# Altium footprint library Footprint-Lib-PhilsLab.PcbLib: 351 footprints (part 19 of 22)
Each footprint in its own frame and in the unit in brackets; x right, y up, seen from the top. Pads: shape width x height; smd on the part's side, far side on the other; paste and mask are expansions set on the pad; w line width, h text height; cw(c..) or ccw(c..) is an arc to the next point about the centre after c.
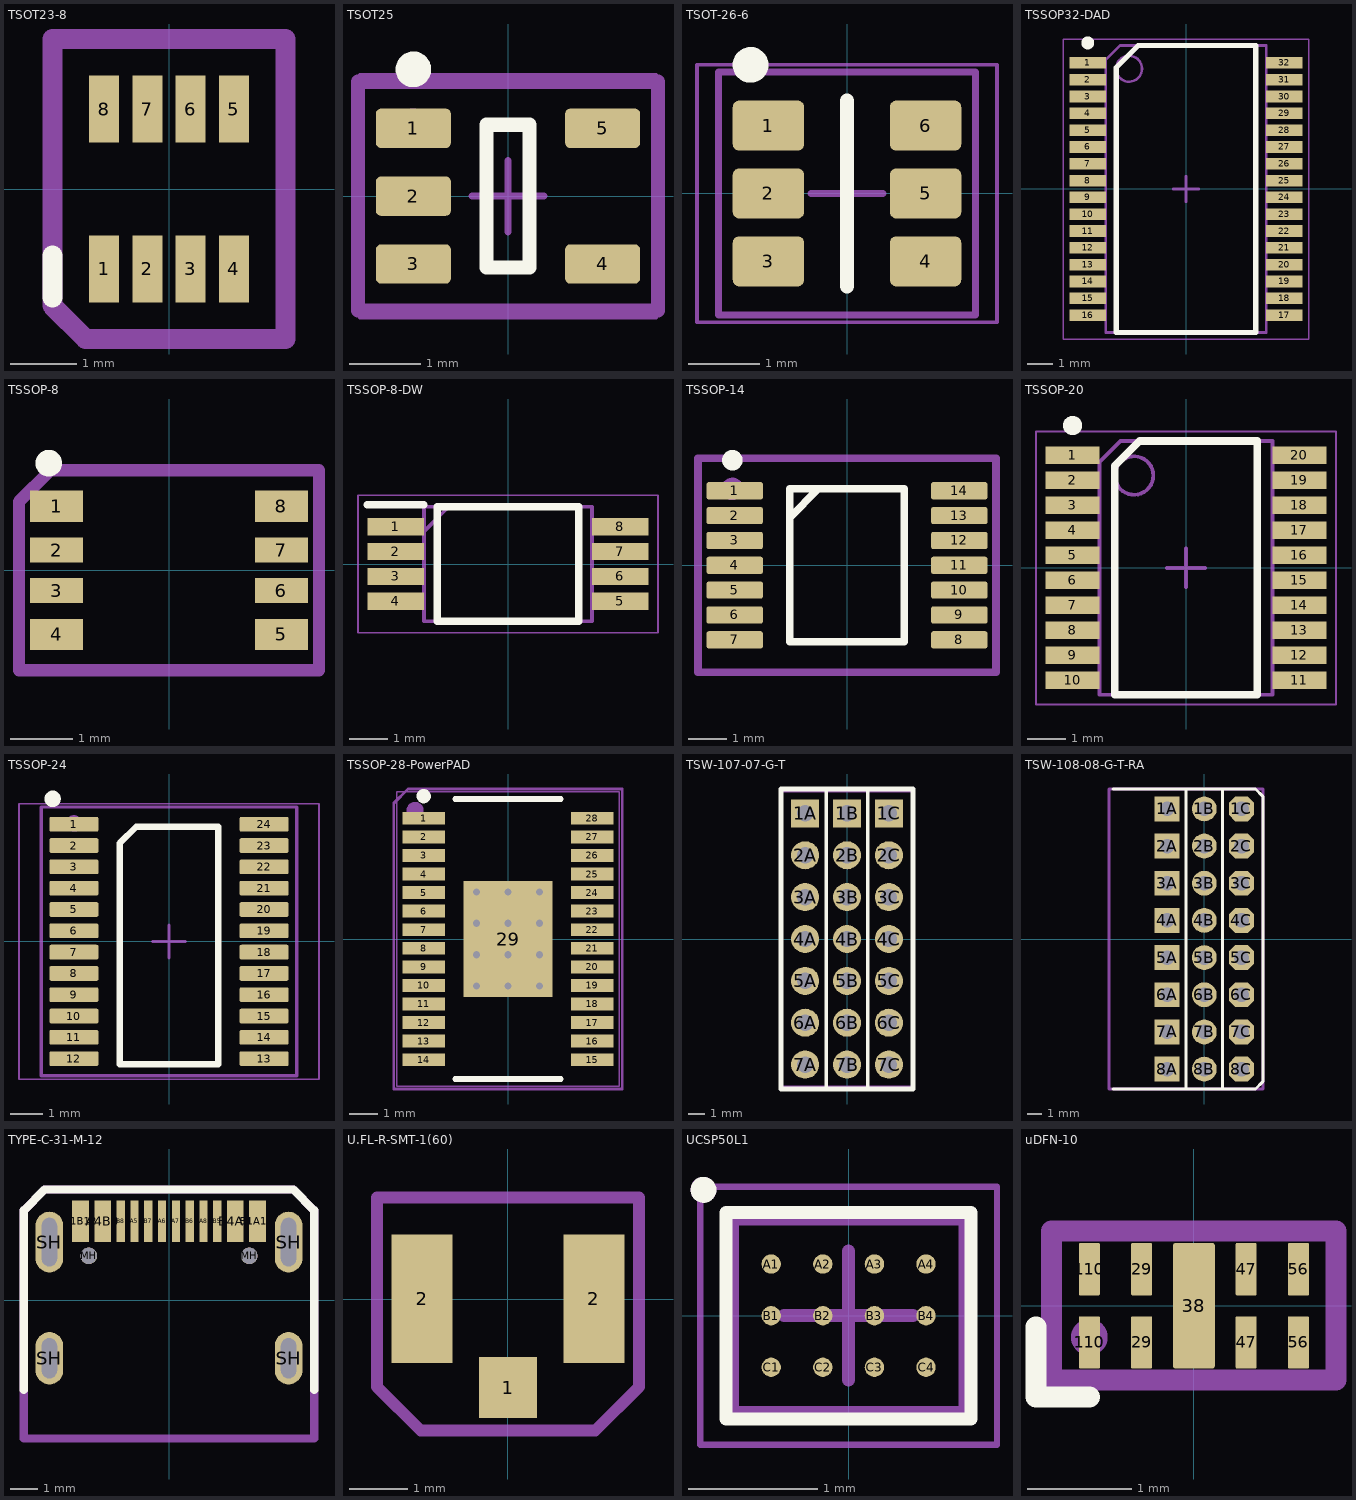
[diagram p18: the footprints below, top view; thin cyan lines are the x and y axes]

## TSOT23-8 [mm]
pads (8):
  rect 0.45x1 smd: 1(-0.975,-1.2) 2(-0.325,-1.2) 3(0.325,-1.2) 4(0.975,-1.2) 5(0.975,1.2) 6(0.325,1.2) 7(-0.325,1.2) 8(-0.975,1.2)
Top Overlay:
  lines w0.3: -1.75,-1.628 -1.75,-1
Mechanical 13:
  lines w0.3: -1.75,-1.75 -1.75,0 -1.75,2.25 1.75,2.25 1.75,-2.25 -1.25,-2.25 -1.75,-1.75
  text "'.Designator'" at -5.84,-0.925 h1
3D body "TSOT-23-8.STEP": height 1.01, standoff 0.01, extent -1.45,-1.4 1.45,1.4

## TSOT25 [mm] "SOT23, 5-Leads, Body 2.90x2.80mm, Pitch 0.95mm, IPC Medium Density"
height 1
pads (5):
  rrect25% 1.05x0.55 smd: 1(-1.325,0.95) 2(-1.325,0) 3(-1.325,-0.95) 4(1.325,-0.95) 5(1.325,0.95)
Top Overlay:
  circle w0.25: c-1.325,1.775 r0.125
  lines w0.2: -0.3,-1 -0.3,1 0.3,1 0.3,-1 -0.3,-1
Mechanical 13:
  circle w0.25: c-1.325,0.975 r0.125
  lines w0.2: -2.1,-1.6 -2.1,1.6 2.1,1.6 2.1,-1.6 -2.1,-1.6
  text "'.Designator'" at -5.815,-0.9 h1
Mechanical 15:
  lines w0.05: -2.075,-1.7 2.075,-1.7 2.075,1.7 -2.075,1.7 -2.075,-1.7
  lines w0.1: -0.5,0 0.5,0 ; 0,-0.5 0,0.5
3D body "TSOT25.step": height 1, standoff 0, extent -1.4,-1.45 1.4,1.45

## TSOT-26-6 [mm] "TSOP, 6-Leads, Body 2.90x1.60mm, Pitch 0.95mm, IPC Medium Density"
height 1
pads (6):
  rrect25% 1x0.7 smd: 1(-1.1,0.95) 2(-1.1,0) 3(-1.1,-0.95) 4(1.1,-0.95) 5(1.1,0) 6(1.1,0.95)
Top Overlay:
  circle w0.25: c-1.35,1.8 r0.125
  lines w0.2: 0,-1.3 0,1.3
Mechanical 13:
  lines w0.1: -1.8,-1.7 -1.8,1.7 1.8,1.7 1.8,-1.7 -1.8,-1.7
  text ".Designator" at -4.998,-0.333 h1
Mechanical 15:
  lines w0.05: -2.1,-1.8 -2.1,1.8 2.1,1.8 2.1,-1.8 -2.1,-1.8
  lines w0.1: -0.5,0 0.5,0 ; 0,-0.5 0,0.5
3D body "TSOT-26-6.step": height 1, standoff 0, extent -1.4,-1.55 1.4,1.55

## TSSOP32-DAD [mm] "TSOP, 32-Leads, Body 11.00x6.10mm, Pitch 0.65mm, IPC Medium Density"
height 1.15
pads (32):
  rect 1.4x0.45 smd: 1(-3.8,4.875) 2(-3.8,4.225) 3(-3.8,3.575) 4(-3.8,2.925) 5(-3.8,2.275) 6(-3.8,1.625) 7(-3.8,0.975) 8(-3.8,0.325) 9(-3.8,-0.325) 10(-3.8,-0.975) 11(-3.8,-1.625) 12(-3.8,-2.275) 13(-3.8,-2.925) 14(-3.8,-3.575) 15(-3.8,-4.225) 16(-3.8,-4.875) 17(3.8,-4.875) 18(3.8,-4.225) 19(3.8,-3.575) 20(3.8,-2.925) 21(3.8,-2.275) 22(3.8,-1.625) 23(3.8,-0.975) 24(3.8,-0.325) 25(3.8,0.325) 26(3.8,0.975) 27(3.8,1.625) 28(3.8,2.275) 29(3.8,2.925) 30(3.8,3.575) 31(3.8,4.225) 32(3.8,4.875)
Top Overlay:
  circle w0.25: c-3.8,5.65 r0.125
  lines w0.2: -2.7,-5.55 2.7,-5.55 2.7,5.55 -1.85,5.55 -2.7,4.7 -2.7,-5.55
Mechanical 13:
  circle w0.1: c-2.2,4.65 r0.5
  lines w0.1: -3.1,-5.55 -3.1,5 -2.55,5.55 3.1,5.55 3.1,-5.55 -3.1,-5.55
  text "'.Designator'" at -6.315,-1.4 h1
Mechanical 15:
  lines w0.05: -4.75,-5.8 -4.75,5.8 4.75,5.8 4.75,-5.8 -4.75,-5.8
  lines w0.1: -0.5,0 0.5,0 ; 0,-0.5 0,0.5
3D body "TSSOP32-DAD.step": height 1.15, standoff 0, extent -4.05,-5.55 4.05,5.55

## TSSOP-8 [mm]
pads (8):
  rect 0.85x0.5 smd mask+0.07: 1(-1.8,1.025) 4(-1.8,-1.025) 5(1.8,-1.025) 8(1.8,1.025)
  rect 0.85x0.4 smd mask+0.07: 2(-1.8,0.325) 3(-1.8,-0.325) 6(1.8,-0.325) 7(1.8,0.325)
Top Overlay:
  circle w0.25: c-1.925,1.715 r0.088
Mechanical 13:
  lines w0.2: -2.4,-1.6 2.4,-1.6 2.4,1.6 -1.9,1.6 -2.4,1.1 -2.4,0 -2.4,-1.6
  text "'.Designator'" at -5.84,-0.925 h1
3D body "TSSPO8.step": height 0.86, standoff -0.06, extent -2.018,-1.5 2.006,1.5

## TSSOP-8-DW [mm]
pads (8):
  rect 1.475x0.45 smd mask+0.05: 1(-2.938,0.975) 2(-2.938,0.325) 3(-2.938,-0.325) 4(-2.938,-0.975) 5(2.938,-0.975) 6(2.938,-0.325) 7(2.938,0.325) 8(2.938,0.975)
Top Overlay:
  lines w0.2: -3.675,1.55 -2.2,1.55 ; -1.85,-1.5 1.85,-1.5 1.85,1.5 -1.85,1.5 -1.85,-1.5
Mechanical 13:
  lines w0.1: -2.2,0.85 -1.55,1.5 ; -2.2,-1.5 2.2,-1.5 2.2,1.5 -2.2,1.5 -2.2,-1.5
  text "'.Designator'" at -5.84,-0.925 h1
Mechanical 15:
  lines w0.05: -3.925,-1.8 3.925,-1.8 3.925,1.8 -3.925,1.8 -3.925,-1.8
3D body "M24C08-RDW6TP.stp": height 1.2, standoff 0, extent -3.2,-1.5 3.2,1.5

## TSSOP-14 [mm]
pads (14):
  rrect25% 1.475x0.45 smd mask+0.05: 1(-2.938,1.95) 2(-2.938,1.3) 3(-2.938,0.65) 4(-2.938,0) 5(-2.938,-0.65) 6(-2.938,-1.3) 7(-2.938,-1.95) 8(2.938,-1.95) 9(2.938,-1.3) 10(2.938,-0.65) 11(2.938,0) 12(2.938,0.65) 13(2.938,1.3) 14(2.938,1.95)
Top Overlay:
  circle w0.3: c-3,2.75 r0.118
  lines w0.2: -0.75,2 -1.5,1.25 ; -1.5,1.25 -1.5,1.25 ; -1.5,-2 1.5,-2 1.5,2 -1.5,2 -1.5,-2
Mechanical 13:
  circle w0.3: c-3,2 r0.141
  lines w0.2: -3.9,-2.8 3.9,-2.8 3.9,2.8 -3.9,2.8 -3.9,-2.8
  text "'.Designator'" at -5.84,-0.925 h1
Mechanical 15:
  lines w0.05: -3.925,-2.8 3.925,-2.8 3.925,2.8 -3.925,2.8 -3.925,-2.8
3D body "LM339PW.stp": height 1.13, standoff 0, extent -3.2,-2.5 3.2,2.5

## TSSOP-20 [mm] "TSOP, 20-Leads, Body 6,50x4,40mm, Pitch 0,65mm, IPC Medium Density"
height 1.2
pads (20):
  rect 1.4x0.45 smd mask+0.15: 1(-2.95,2.925) 2(-2.95,2.275) 3(-2.95,1.625) 4(-2.95,0.975) 5(-2.95,0.325) 6(-2.95,-0.325) 7(-2.95,-0.975) 8(-2.95,-1.625) 9(-2.95,-2.275) 10(-2.95,-2.925) 11(2.95,-2.925) 12(2.95,-2.275) 13(2.95,-1.625) 14(2.95,-0.975) 15(2.95,-0.325) 16(2.95,0.325) 17(2.95,0.975) 18(2.95,1.625) 19(2.95,2.275) 20(2.95,2.925)
Top Overlay:
  circle w0.25: c-2.95,3.7 r0.125
  lines w0.2: -1.85,-3.3 -1.85,2.65 -1.2,3.3 1.85,3.3 1.85,-3.3 -1.85,-3.3
Mechanical 13:
  circle w0.1: c-1.35,2.4 r0.5
  lines w0.1: -2.25,-3.3 -2.25,2.75 -1.7,3.3 2.25,3.3 2.25,-3.3 -2.25,-3.3
  text "'.Designator'" at -5.815,-0.9 h1
Mechanical 15:
  lines w0.05: -3.9,-3.55 3.9,-3.55 3.9,3.55 -3.9,3.55 -3.9,-3.55
  lines w0.1: -0.5,0 0.5,0 ; 0,-0.5 0,0.5
3D body "TSSOP-20.step": height 1.2, standoff 0, extent -3.2,-3.3 3.2,3.3

## TSSOP-24 [mm]
height 1.2
pads (24):
  rrect25% 1.5x0.45 smd mask+0.13: 1(-2.9,3.575) 2(-2.9,2.925) 3(-2.9,2.275) 4(-2.9,1.625) 5(-2.9,0.975) 6(-2.9,0.325) 7(-2.9,-0.325) 8(-2.9,-0.975) 9(-2.9,-1.625) 10(-2.9,-2.275) 11(-2.9,-2.925) 12(-2.9,-3.575) 13(2.9,-3.575) 14(2.9,-2.925) 15(2.9,-2.275) 16(2.9,-1.625) 17(2.9,-0.975) 18(2.9,-0.325) 19(2.9,0.325) 20(2.9,0.975) 21(2.9,1.625) 22(2.9,2.275) 23(2.9,2.925) 24(2.9,3.575)
Top Overlay:
  circle w0.25: c-3.55,4.35 r0.125
  lines w0.2: -1.5,-3.75 -1.5,3 -1,3.5 1.5,3.5 1.5,-3.75 -1.5,-3.75
Mechanical 13:
  circle w0.25: c-2.9,3.6 r0.125
  lines w0.1: -3.9,-4.1 -3.9,4.1 3.9,4.1 3.9,-4.1 -3.9,-4.1
  text "'.Designator'" at -7.315,-2.4 h1
Mechanical 15:
  lines w0.05: -4.575,-4.2 -4.575,4.2 4.575,4.2 4.575,-4.2 -4.575,-4.2
  lines w0.1: -0.5,0 0.5,0 ; 0,-0.5 0,0.5
3D body "TSSOP-24.step": height 1.21, standoff 0.01, extent -3.275,-3.95 3.275,3.95

## TSSOP-28-PowerPAD [mm] "TSOP, 28-Leads, Body 9.70x4.40mm, Pitch 0.65mm, Thermal Pad 4.05x3.10mm, IPC Medium Density"
height 1.2
pads (29):
  rect 1.5x0.45 smd: 1(-2.95,4.225) 2(-2.95,3.575) 3(-2.95,2.925) 4(-2.95,2.275) 5(-2.95,1.625) 6(-2.95,0.975) 7(-2.95,0.325) 8(-2.95,-0.325) 9(-2.95,-0.975) 10(-2.95,-1.625) 11(-2.95,-2.275) 12(-2.95,-2.925) 13(-2.95,-3.575) 14(-2.95,-4.225) 15(2.95,-4.225) 16(2.95,-3.575) 17(2.95,-2.925) 18(2.95,-2.275) 19(2.95,-1.625) 20(2.95,-0.975) 21(2.95,-0.325) 22(2.95,0.325) 23(2.95,0.975) 24(2.95,1.625) 25(2.95,2.275) 26(2.95,2.925) 27(2.95,3.575) 28(2.95,4.225)
  rect 3.1x4.05 smd: 29(0,0)
via 1.1,-1.65 diameter 0.6 hole 0.25
via 0,-1.65 diameter 0.6 hole 0.25
via -1.1,-1.65 diameter 0.6 hole 0.25
via 1.1,-0.55 diameter 0.6 hole 0.25
via 0,-0.55 diameter 0.6 hole 0.25
via -1.1,-0.55 diameter 0.6 hole 0.25
via 1.1,0.55 diameter 0.6 hole 0.25
via 0,0.55 diameter 0.6 hole 0.25
via -1.1,0.55 diameter 0.6 hole 0.25
via 1.1,1.65 diameter 0.6 hole 0.25
via 0,1.65 diameter 0.6 hole 0.25
via -1.1,1.65 diameter 0.6 hole 0.25
Top Overlay:
  circle w0.25: c-2.95,5 r0.125
  lines w0.2: -1.85,-4.9 1.85,-4.9 ; -1.85,4.9 1.85,4.9
Mechanical 13:
  circle w0.3: c-3.25,4.5 r0.15
  lines w0.1: -4,-5.25 -4,4.75 -3.5,5.25 4,5.25 4,-5.25 -4,-5.25
  text "'.Designator'" at -5.665,-0.417 h1
Mechanical 15:
  lines w0.05: -3.9,-5.15 3.9,-5.15 3.9,5.15 -3.9,5.15 -3.9,-5.15
  lines w0.1: -0.5,0 0.5,0 ; 0,-0.5 0,0.5
3D body "TSSOP-28-PowerPAD.step": height 1.2, standoff 0, extent -3.2,-4.9 3.2,4.9

## TSW-107-07-G-T [mm]
pads (21):
  rect 1.7x1.7 hole 1: 1A(-2.54,7.62) 1B(0,7.62) 1C(2.54,7.62)
  round 1.7 hole 1: 2A(-2.54,5.08) 2B(0,5.08) 2C(2.54,5.08) 3A(-2.54,2.54) 3B(0,2.54) 3C(2.54,2.54) 4A(-2.54,0) 4B(0,0) 4C(2.54,0) 5A(-2.54,-2.54) 5B(0,-2.54) 5C(2.54,-2.54) 6A(-2.54,-5.08) 6B(0,-5.08) 6C(2.54,-5.08) 7A(-2.54,-7.62) 7B(0,-7.62) 7C(2.54,-7.62)
Top Overlay:
  lines w0.2: -1.25,-9 -1.25,9 ; 1.25,-9 1.25,9
  lines w0.3: -4,-9.1 4,-9.1 4,9.1 -4,9.1 -4,-9.1
Mechanical 13:
  lines w0.2: -4,-9 4,-9 4,9 -4,9 -4,-9
  text "'.Designator'" at -5.84,-0.925 h1
3D body "TSW-107-07-G-T.stp": height 8.39, standoff -2.53, extent -3.81,-8.89 3.81,8.89

## TSW-108-08-G-T-RA [mm]
pads (24):
  rect 1.7x1.7 hole 1: 1A(-2.54,8.89) 2A(-2.54,6.35) 3A(-2.54,3.81) 4A(-2.54,1.27) 5A(-2.54,-1.27) 6A(-2.54,-3.81) 7A(-2.54,-6.35) 8A(-2.54,-8.89)
  round 1.7 hole 1: 1B(0,8.89) 2B(0,6.35) 3B(0,3.81) 4B(0,1.27) 5B(0,-1.27) 6B(0,-3.81) 7B(0,-6.35) 8B(0,-8.89)
  oct 1.7x1.7 hole 1: 1C(2.54,8.89) 2C(2.54,6.35) 3C(2.54,3.81) 4C(2.54,1.27) 5C(2.54,-1.27) 6C(2.54,-3.81) 7C(2.54,-6.35) 8C(2.54,-8.89)
Top Overlay:
  lines w0.2: -6.25,-10.25 3.5,-10.25 4,-9.75 4,9.75 3.5,10.25 -6.25,10.25 ; -1.25,-10.25 -1.25,10.25 ; 1.25,-10.25 1.25,10.25
Mechanical 13:
  lines w0.2: -6.5,-10.25 -6.5,10.25 4,10.25 4,-10.25 -6.5,-10.25
  text "PCB EDGE" at -6.65,-3.045 h0.5
  text "'.Designator'" at -5.84,-0.925 h1
3D body "TSW-108-08-F-T-RA.stp": height 8.14, standoff -2.27, extent -12.446,-10.16 2.858,10.16

## TYPE-C-31-M-12 [mm]
pads (18):
  rect 0.6x1.5 smd mask+0.07: A1B12(-3.2,2.85) B1A12(3.2,2.85)
  rect 0.6x1.5 smd mask+0.14: A4B9(-2.4,2.85) B4A9(2.4,2.85)
  rect 0.3x1.5 smd mask+0.14: A5(-1.25,2.85) A6(-0.25,2.85) A7(0.25,2.85) A8(1.25,2.85) B5(1.75,2.85) B6(0.75,2.85) B7(-0.75,2.85) B8(-1.75,2.85)
  round 0.6 hole 0.6 unplated mask+0.3: MH(-2.9,1.6) MH(2.9,1.6)
  oval 1x1.9 hole 0.55 slot 1.45 at 90 deg mask+0.05: SH(-4.325,-2.1) SH(4.325,-2.1)
  oval 1x2.2 hole 0.55 slot 1.75 at 90 deg mask+0.05: SH(-4.325,2.1) SH(4.325,2.1)
Top Overlay:
  lines w0.3: -5.25,-3.25 -5.25,3.25 -4.5,4 4.5,4 5.25,3.25 5.25,-3.25
Mechanical 13:
  lines w0.3: -5.25,-5 -5.25,2.75 -5.25,3.25 -4.5,4 4.5,4 5.25,3.25 5.25,-5 -5.25,-5
  text "'.Designator'" at -5.815,-0.9 h1
3D body "TYPE-C-31-M-12.STEP": height 3.32, standoff -0.98, extent -4.47,-4.65 4.47,3.255

## U.FL-R-SMT-1(60) [mm]
pads (3):
  rect 1x1.05 smd mask+0.07: 1(0,-1.512)
  rect 1.05x2.2 smd mask+0.07: 2(-1.475,0.013) 2(1.475,0.013)
Mechanical 13:
  lines w0.2: -2.25,-1.5 -1.5,-2.25 1.5,-2.25 2.25,-1.5 2.25,1.75 -2.25,1.75 -2.25,0 -2.25,-1.5
  text "'.Designator'" at -5.84,-0.925 h1
3D body "U.FL-R-SMT-1.stp": height 1.26, standoff 0.01, extent -1.5,-1.55 1.5,1.55

## UCSP50L1 [mm]
height 0.55
pads (12):
  round 0.15 smd mask+0.05: A1(-0.6,0.4) A2(-0.2,0.4) A3(0.2,0.4) A4(0.6,0.4) B1(-0.6,0) B2(-0.2,0) B3(0.2,0) B4(0.6,0) C1(-0.6,-0.4) C2(-0.2,-0.4) C3(0.2,-0.4) C4(0.6,-0.4)
Top Overlay:
  circle w0.1: c-1.125,0.975 r0.05
  lines w0.1: -0.95,-0.8 -0.95,0.8 0.95,0.8 0.95,-0.8 -0.95,-0.8
Mechanical 13:
  circle w0.1: c-1.125,0.976 r0.05
  lines w0.1: -0.9,-0.75 0.9,-0.75 0.9,0.75 -0.9,0.75 -0.9,-0.75
  text "'.Designator'" at -5.665,-0.417 h1
Mechanical 15:
  lines w0.05: -1.15,-1 1.15,-1 1.15,1 -1.15,1 -1.15,-1
  lines w0.1: -0.5,0 0.5,0 ; 0,-0.5 0,0.5
3D body "UCSP50L1.step": height 0.55, standoff 0, extent -0.9,-0.75 0.9,0.75

## uDFN-10 [mm]
pads (9):
  rrect10% 0.2x0.5 smd mask+0: 29(-0.5,-0.35) 29(-0.5,0.35) 47(0.5,-0.35) 47(0.5,0.35) 56(1,-0.35) 56(1,0.35) 110(-1,-0.35) 110(-1,0.35)
  rrect10% 0.4x1.2 smd mask+0: 38(0,0)
Top Overlay:
  lines w0.2: -1.51,-0.2 -1.51,-0.874 -1,-0.874
Mechanical 13:
  circle w0.25: c-1,-0.3 r0.05
  lines w0.2: -1.362,-0.711 1.359,-0.711 1.359,0.717 -1.362,0.717 -1.362,-0.711
  text "'.Designator'" at -5.84,-0.925 h1
3D body "uDFN-10.step": height 0.47, standoff 0.01, extent -1.25,-0.51 1.25,0.51